# Altium footprint library chipfc_libs.PCBLIB: 315 footprints (part 7 of 20)
Each footprint in its own frame and in the unit in brackets; x right, y up, seen from the top. Pads: shape width x height; smd on the part's side, far side on the other; paste and mask are expansions set on the pad; w line width, h text height; cw(c..) or ccw(c..) is an arc to the next point about the centre after c.
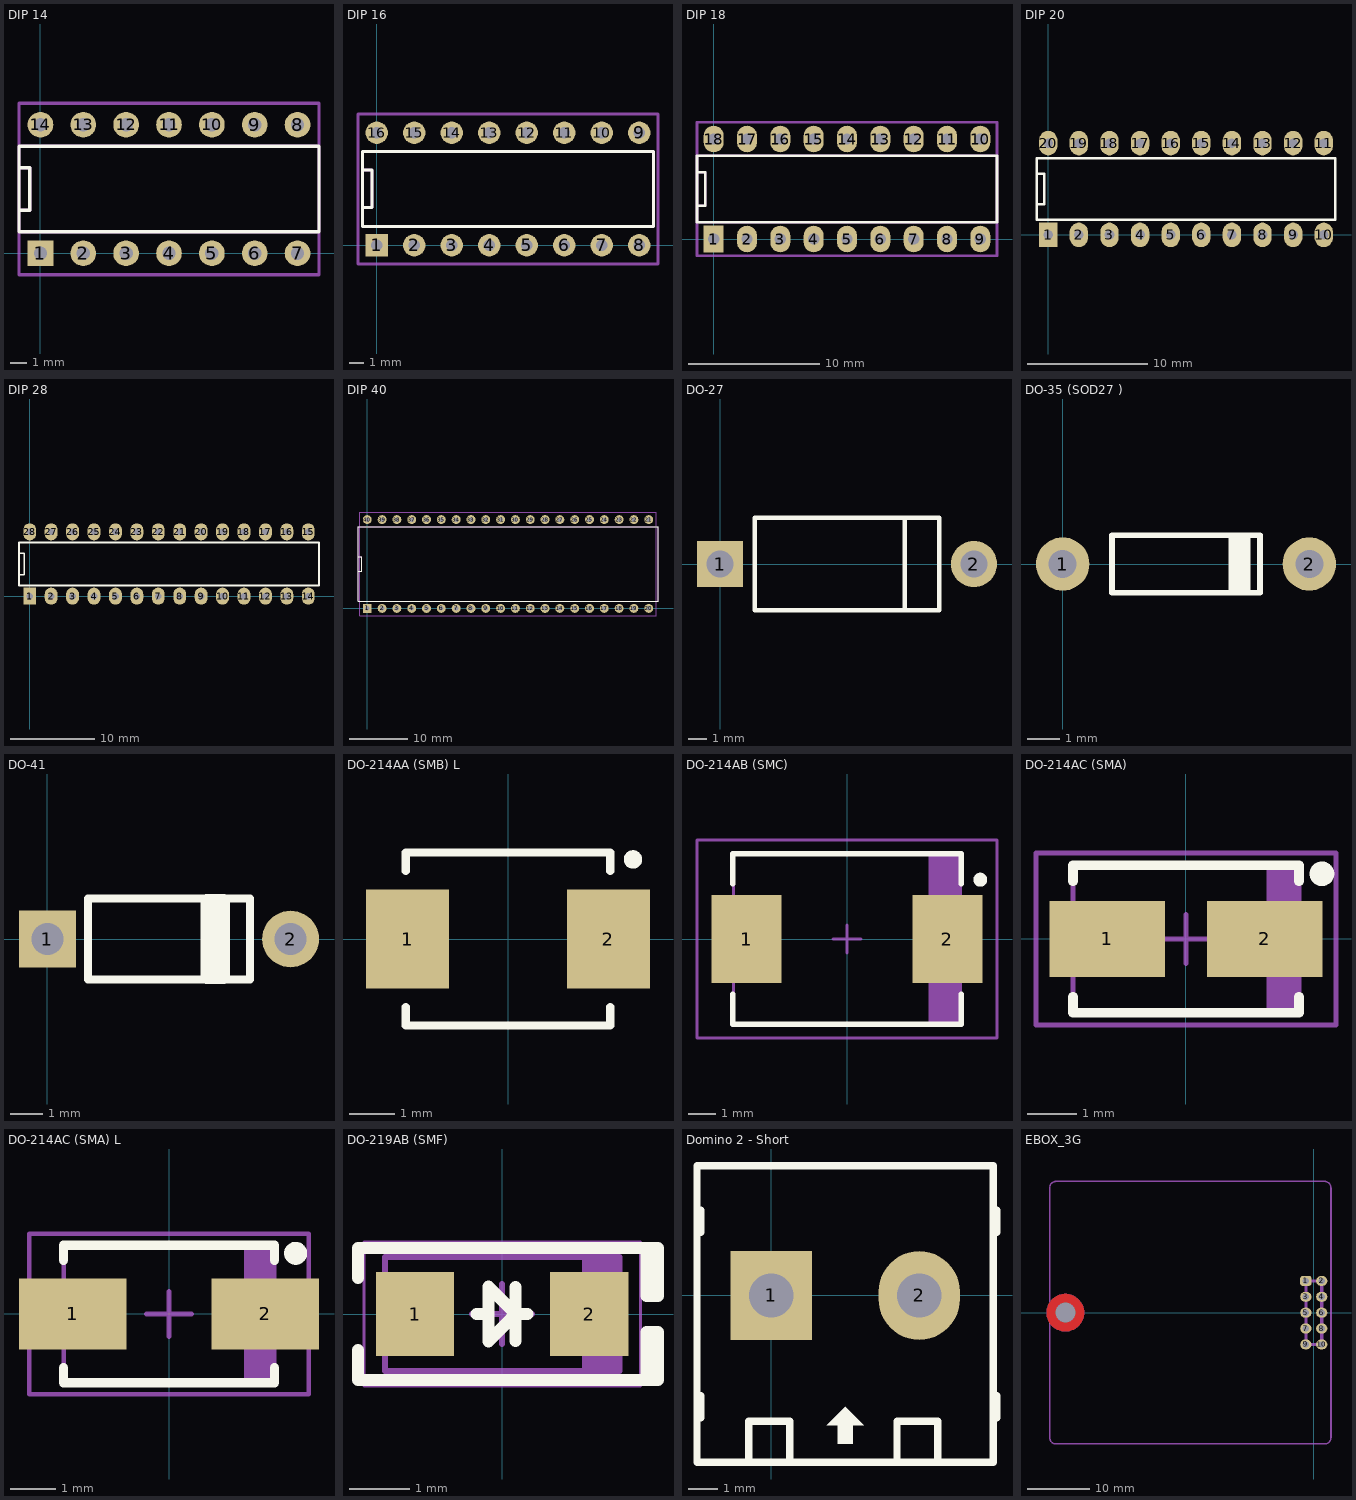
[diagram p6: the footprints below, top view; thin cyan lines are the x and y axes]

## DIP 14 [mil]
pads (14):
  rect 60x60 / inner round 60 / far side rect 60x80 hole 31: 1(0,0)
  round 60 / inner round 60 / far side oval 60x80 hole 31: 2(100,0) 3(200,0) 4(300,0) 5(400,0) 6(500,0) 7(600,0) 8(600,300) 9(500,300) 10(400,300) 11(300,300) 12(200,300) 13(100,300) 14(0,300)
Top Overlay:
  lines w8: -50,100 -25,100 -25,200 -50,200 ; -50,200 -50,250 650,250 650,50 -50,50 -50,200
Mechanical 1:
  lines w8: -50,100 -25,100 -25,200 -50,200 ; -50,200 -50,250 650,250 650,50 -50,50 -50,200
Mechanical 3:
  lines w8: -50,-50 -50,50 -50,100 -50,350 -47.7,350 650,350 650,250 650,-50 -50,-50

## DIP 16 [mil]
pads (16):
  rect 60x60 / inner round 60 / far side rect 60x80 hole 31: 1(0,0)
  round 60 / inner round 60 / far side oval 60x80 hole 31: 2(100,0) 3(200,0) 4(300,0) 5(400,0) 6(500,0) 7(600,0) 8(700,0) 9(700,300) 10(600,300) 11(500,300) 12(400,300) 13(300,300) 14(200,300) 15(100,300) 16(0,300)
Top Overlay:
  lines w8: -37.5,100 -37.5,200 ; -37.5,100 -37.5,50 737.5,50 737.5,250 -37.5,250 -37.5,200 ; -37.5,100 -12.5,100 -12.5,200 -37.5,200
Mechanical 1:
  lines w8: -37.5,100 -37.5,200 ; -37.5,100 -37.5,50 737.5,50 737.5,250 -37.5,250 -37.5,200 ; -37.5,100 -12.5,100 -12.5,200 -37.5,200
Mechanical 3:
  lines w8: -50,-50 750,-50 750,250 750,350 -50,350 -50,200 -50,100 -50,50 -50,-50

## DIP 18 [mil]
pads (18):
  rect 60x80 hole 34: 1(0,0)
  oval 60x80 hole 34: 2(100,0) 3(200,0) 4(300,0) 5(400,0) 6(500,0) 7(600,0) 8(700,0) 9(800,0) 10(800,300) 11(700,300) 12(600,300) 13(500,300) 14(400,300) 15(300,300) 16(200,300) 17(100,300) 18(0,300)
Top Overlay:
  lines w8: -50,100 -25,100 -25,200 -50,200 ; -50,50 850,50 850,250 -50,250 -50,50
Mechanical 1:
  lines w8: -50,100 -25,100 -25,200 -50,200 ; -50,50 850,50 850,250 -50,250 -50,50
Mechanical 3:
  lines w8: -50,-50 -50,50 -50,100 -50,200 -50,350 850,350 850,246.8 850,49 850,-50 -50,-50

## DIP 20 [mil]
pads (20):
  rect 60x80 hole 31.5: 1(0,0)
  oval 60x80 hole 31.5: 2(100,0) 3(200,0) 4(300,0) 5(400,0) 6(500,0) 7(600,0) 8(700,0) 9(800,0) 10(900,0) 11(900,300) 12(800,300) 13(700,300) 14(600,300) 15(500,300) 16(400,300) 17(300,300) 18(200,300) 19(100,300) 20(0,300)
Top Overlay:
  lines w8: -37.5,100 -12.5,100 -12.5,200 -37.5,200 ; -37.5,100 -37.5,50 937.5,50 937.5,250 -37.5,250 -37.5,200 ; -37.5,100 -37.5,200

## DIP 28 [mil]
pads (28):
  rect 60x80 hole 31.5: 1(0,0)
  oval 60x80 hole 31.5: 2(100,0) 3(200,0) 4(300,0) 5(400,0) 6(500,0) 7(600,0) 8(700,0) 9(800,0) 10(900,0) 11(1000,0) 12(1100,0) 13(1200,0) 14(1300,0) 15(1300,300) 16(1200,300) 17(1100,300) 18(1000,300) 19(900,300) 20(800,300) 21(700,300) 22(600,300) 23(500,300) 24(400,300) 25(300,300) 26(200,300) 27(100,300) 28(0,300)
Top Overlay:
  lines w8: -50,100 -25,100 -25,200 -50,200 ; -50,100 -50,200 ; -50,100 -50,50 1350,50 1350,250 -50,250 -50,200

## DIP 40 [mil]
pads (40):
  rect 60x60 / inner round 60 / far side rect 60x80 hole 31: 1(0,0)
  round 60 / inner round 60 / far side oval 60x80 hole 31: 2(100,0) 3(200,0) 4(300,0) 5(400,0) 6(500,0) 7(600,0) 8(700,0) 9(800,0) 10(900,0) 11(1000,0) 12(1100,0) 13(1200,0) 14(1300,0) 15(1400,0) 16(1500,0) 17(1600,0) 18(1700,0) 19(1800,0) 20(1900,0) 21(1900,600) 22(1800,600) 23(1700,600) 24(1600,600) 25(1500,600) 26(1400,600) 27(1300,600) 28(1200,600) 29(1100,600) 30(1000,600) 31(900,600) 32(800,600) 33(700,600) 34(600,600) 35(500,600) 36(400,600) 37(300,600) 38(200,600) 39(100,600) 40(0,600)
Top Overlay:
  lines w8: -62.5,250 -37.5,250 -37.5,350 -62.5,350 ; -62.5,250 -62.5,50 1962.5,50 1962.5,550 -62.5,550 -62.5,350 ; -62.5,250 -62.5,350
Mechanical 1:
  lines w8: -62.5,250 -37.5,250 -37.5,350 -62.5,350 ; -62.5,250 -62.5,50 1962.5,50 1962.5,550 -62.5,550 -62.5,350 ; -62.5,250 -62.5,350
Mechanical 3:
  lines w8: -50,-50 -50,350 -50,650 1950,650 1950,-50 -50,-50

## DO-27 [mm]
height 2.54
pads (2):
  rect 2.54x2.54 hole 1.5: 1(0,0)
  round 2.54 hole 1.5: 2(13.97,0)
Top Overlay:
  lines w0.254: 10.16,-2.54 10.16,2.54 ; 1.905,-2.54 1.905,2.54 12.065,2.54 12.065,-2.54 1.905,-2.54

## DO-35 (SOD27 ) [mil]
pads (2):
  round 65 hole 34: 1(0,0) 2(300,0)
Top Overlay:
  lines w7: 205,-35 205,35 ; 210,-35 210,35 ; 215,-35 215,35 ; 220,-35 220,35 ; 225,-35 225,35 ; 60,-35 240,-35 240,35 60,35 60,-35
3D body "User Library-DO-35.step": height 77.8, standoff -95.83, extent -11.02,-37.79 311.02,37.8

## DO-41 [mil]
height 100
pads (2):
  rect 70x70 hole 39.37: 1(0,0)
  round 70 hole 39.37: 2(300,0)
Top Overlay:
  region: 223.41,53.83 225,50 225,-50 223.41,-53.83 219.59,-55.41 194.59,-55.41 190.76,-53.83 189.18,-50 189.18,50 190.76,53.83 194.59,55.41 219.59,55.41
  lines w10: 50,-50 250,-50 250,50 50,50 50,-50
3D body "User Library-DO-41G-30.step": height 99.25, standoff -78.74, extent -15.36,-47.28 315.35,47.28

## DO-214AA (SMB) L [mm]
pads (2):
  rect 1.82x2.18 smd: 1(-2.21,0) 2(2.21,0)
Top Overlay:
  circle w0.203: c2.75,1.75 r0.102
  lines w0.178: -2.25,-1.5 -2.25,-1.9 2.25,-1.9 2.25,-1.5 ; -2.25,1.5 -2.25,1.9 2.25,1.9 2.25,1.5
3D body "User Library-DIOM5539X24.step": height 2.45, standoff 0.03, extent -2.75,-1.95 2.75,1.95

## DO-214AB (SMC) [mm] "Molded Diode, 2-Leads, Body 7.9x5.8mm, IPC Low Density"
height 2.41
pads (2):
  rect 2.5x3.15 smd: 1(-3.6,0) 2(3.6,0)
Top Overlay:
  circle w0.25: c4.775,2.125 r0.125
  lines w0.2: -4.1,-1.975 -4.1,-3.05 4.1,-3.05 4.1,-1.975 ; -4.1,1.975 -4.1,3.05 4.1,3.05 4.1,1.975
Mechanical 13:
  rectangle: 2.92,-3.05 4.013,3.05
  lines w0.1: -4.065,-3.05 4.065,-3.05 4.065,3.05 -4.065,3.05 -4.065,-3.05
Mechanical 15:
  lines w0.1: -0.5,0 0.5,0 ; 0,-0.5 0,0.5 ; -5.375,-3.55 5.375,-3.55 5.375,3.55 -5.375,3.55 -5.375,-3.55
3D body "User Library-DO-214AB SMC.step": height 2.27, standoff -0.03, extent -3.975,-2.979 3.975,2.921

## DO-214AC (SMA) [mm] "Molded Diode, 2-Leads, Body 4.3x2.7mm, IPC Medium Density"
height 2.5
pads (2):
  rect 2.35x1.55 smd: 1(-1.6,0) 2(1.6,0)
Top Overlay:
  circle w0.25: c2.765,1.325 r0.125
  lines w0.2: -2.3,-1.175 -2.3,-1.5 2.3,-1.5 2.3,-1.175 ; -2.3,1.175 -2.3,1.5 2.3,1.5 2.3,1.175
Mechanical 13:
  rectangle: 1.637,-1.45 2.256,1.45
  lines w0.1: -2.3,-1.45 2.3,-1.45 2.3,1.45 -2.3,1.45 -2.3,-1.45
Mechanical 15:
  lines w0.1: -0.5,0 0.5,0 ; 0,-0.5 0,0.5 ; -3.05,-1.75 3.05,-1.75 3.05,1.75 -3.05,1.75 -3.05,-1.75
3D body "User Library-DO-214AC SMA.step": height 2.4, standoff 0, extent -2.6,-1.295 2.6,1.305

## DO-214AC (SMA) L [mm] "Molded Diode, 2-Leads, Body 4.3x2.7mm, IPC Medium Density"
height 2.5
pads (2):
  rect 2.35x1.55 smd: 1(-2.1,0) 2(2.1,0)
Top Overlay:
  circle w0.25: c2.765,1.325 r0.125
  lines w0.2: -2.3,-1.175 -2.3,-1.5 2.3,-1.5 2.3,-1.175 ; -2.3,1.175 -2.3,1.5 2.3,1.5 2.3,1.175
Mechanical 13:
  rectangle: 1.637,-1.45 2.256,1.45
  lines w0.1: -2.3,-1.45 -2.3,1.45 2.3,1.45 2.3,-1.45 -2.3,-1.45
Mechanical 15:
  lines w0.1: -0.5,0 0.5,0 ; 0,-0.5 0,0.5 ; -3.05,-1.75 -3.05,1.75 3.05,1.75 3.05,-1.75 -3.05,-1.75
3D body "User Library-DO-214AC SMA.step": height 2.4, standoff 0, extent -2.6,-1.295 2.6,1.305

## DO-219AB (SMF) [mm] "Molded Diode, 2-Leads, Body 3.90x1.90mm, IPC Medium Density"
height 1.1
pads (2):
  rect 1.3x1.4 smd: 1(-1.45,0) 2(1.45,0)
Top Overlay:
  lines w0.2: -2.4,-0.6 -2.4,-1.1 2.594,-1.1 2.594,-0.3 2.4,-0.3 2.4,-1.1 ; -2.4,0.6 -2.4,1.1 2.594,1.1 2.594,0.3 2.4,0.3 2.4,1.1 ; -0.429,-0.004 -0.229,-0.004 ; 0.225,-0.45 0.225,0.45 ; 0.425,0 0.225,0 ; 0.225,0 -0.229,-0.454 -0.229,0.454 0.225,0
Mechanical 13:
  rectangle: 1.331,-0.95 1.95,0.95
  lines w0.1: -1.95,-0.95 -1.95,0.95 1.95,0.95 1.95,-0.95 -1.95,-0.95
Mechanical 15:
  lines w0.05: -2.3,-1.2 2.3,-1.2 2.3,1.2 -2.3,1.2 -2.3,-1.2
  lines w0.1: -0.5,0 0.5,0 ; 0,-0.5 0,0.5
3D body "Vishay - SMF.step": height 1.18, standoff 0, extent -1.5,-0.898 1.5,0.898

## Domino 2 - Short [mil] "Header 2, 2 pin, hight 400mil, Pin to Pin 200mil, Colour Green"
height 300
pads (2):
  rect 110x120 hole 60: 1(0,0)
  oval 110x120 hole 60: 2(200,0)
Top Overlay:
  region: 100,-150 75,-175 90,-175 90,-200 110,-200 110,-175 125,-175
  lines w10: -95,-165 -95,-135 ; -95,85 -95,115 ; -30,-225 -30,-170 25,-170 25,-225 ; 170,-225 170,-170 225,-170 225,-225 ; 305,-165 305,-135 ; 305,85 305,115 ; -100,-225 -100,175 300,175 300,-225 -100,-225
3D body "2 way std vertical terminal 5.08mm pitch.stp": height 559.05, standoff -137.8, extent -129.17,-217.91 300,167.91

## EBOX_3G [mm]
pads (11):
  rrect50% 1.8x1.6 hole 1: 1(-1.27,5.08)
  oval 1.8x1.6 hole 1: 2(1.27,5.08) 3(-1.27,2.54) 4(1.27,2.54) 5(-1.27,0) 6(1.27,0) 7(-1.27,-2.54) 8(1.27,-2.54) 9(-1.27,-5.08) 10(1.27,-5.08)
  round 0 hole 3.2 unplated: HOLE(-39.75,0)
Top Layer:
  pour cut-out: -42.75,0 -42.75,-0.197 -42.699,-0.586 -42.597,-0.966 -42.446,-1.33 -42.25,-1.67 -42.01,-1.982 -41.732,-2.26 -41.42,-2.5 -41.08,-2.696 -40.716,-2.847 -40.337,-2.949 -39.947,-3 -39.75,-3 -39.553,-3 -39.164,-2.949 -38.784,-2.847 -38.42,-2.696 -38.08,-2.5 -37.768,-2.26 -37.49,-1.982 -37.25,-1.67 -37.054,-1.33 -36.903,-0.966 -36.801,-0.586 -36.75,-0.197 -36.75,0 -36.75,0.197 -36.801,0.587 -36.903,0.967 -37.054,1.33 -37.25,1.67 -37.49,1.982 -37.768,2.26 -38.08,2.5 -38.42,2.696 -38.784,2.847 -39.164,2.949 -39.553,3 -39.75,3 -39.947,3 -40.337,2.949 -40.716,2.847 -41.08,2.696 -41.42,2.5 -41.732,2.26 -42.01,1.982 -42.25,1.67 -42.446,1.33 -42.597,0.966 -42.699,0.587 -42.75,0.197
Bottom Layer:
  pour cut-out: -42.75,0 -42.75,-0.197 -42.699,-0.586 -42.597,-0.966 -42.446,-1.33 -42.25,-1.67 -42.01,-1.982 -41.732,-2.26 -41.42,-2.5 -41.08,-2.696 -40.716,-2.847 -40.337,-2.949 -39.947,-3 -39.75,-3 -39.553,-3 -39.164,-2.949 -38.784,-2.847 -38.42,-2.696 -38.08,-2.5 -37.768,-2.26 -37.49,-1.982 -37.25,-1.67 -37.054,-1.33 -36.903,-0.966 -36.801,-0.586 -36.75,-0.197 -36.75,0 -36.75,0.197 -36.801,0.587 -36.903,0.967 -37.054,1.33 -37.25,1.67 -37.49,1.982 -37.768,2.26 -38.08,2.5 -38.42,2.696 -38.784,2.847 -39.164,2.949 -39.553,3 -39.75,3 -39.947,3 -40.337,2.949 -40.716,2.847 -41.08,2.696 -41.42,2.5 -41.732,2.26 -42.01,1.982 -42.25,1.67 -42.446,1.33 -42.597,0.966 -42.699,0.587 -42.75,0.197
Bottom Overlay:
  circle w0.203: c-39.75,0 r2.5
  region: -39.75,-2.5 -39.725,-2.5 -39.482,-2.5 -39.003,-2.405 -38.553,-2.218 -38.147,-1.947 -37.975,-1.775 -38.625,-1.125 -38.737,-1.226 -38.987,-1.394 -39.265,-1.509 -39.561,-1.568 -39.711,-1.575 -39.75,-1.575
  region: -42.25,0 -42.25,-0.025 -42.25,-0.268 -42.155,-0.747 -41.968,-1.197 -41.697,-1.603 -41.525,-1.775 -40.875,-1.125 -40.976,-1.013 -41.144,-0.763 -41.259,-0.485 -41.318,-0.189 -41.325,-0.039 -41.325,0
  region: -39.75,2.5 -39.775,2.5 -40.019,2.5 -40.497,2.405 -40.947,2.218 -41.353,1.947 -41.525,1.775 -40.875,1.125 -40.763,1.226 -40.513,1.394 -40.235,1.509 -39.939,1.568 -39.789,1.575 -39.75,1.575
  region: -37.25,0 -37.25,0.025 -37.25,0.269 -37.345,0.747 -37.532,1.197 -37.803,1.603 -37.975,1.775 -38.625,1.125 -38.524,1.013 -38.356,0.763 -38.241,0.485 -38.182,0.189 -38.175,0.039 -38.175,0
  lines w0.203: -2.667,6.604 -2.54,6.477 ; -2.54,6.477 2.54,6.477 2.54,-6.35 -2.54,-6.35 -2.54,6.477
  lines w0.254: -44.446,-21.431 -44.445,-21.43 3.555,-21.43 3.554,-21.429 3.554,20.571 -44.446,20.571 -44.446,-21.431
Mechanical 1:
  circle w0.254: c-1.27,5.08 r0.5
  circle w0.254: c1.27,-5.08 r0.5
  circle w0.254: c-39.75,0 r1.06
  lines w0.254: -41.25,21 ccw(c-41.25,20) -42.25,20 -42.25,-20 ccw(c-41.25,-20) -41.25,-21 1.75,-21 ccw(c1.75,-20) 2.75,-20 2.75,20 ccw(c1.75,20) 1.75,21 ; -41.25,21 1.75,21
  lines w0.5: -1.27,-5.08 -1.27,5.08 1.27,5.08 1.27,-5.08 -1.27,-5.08
  text "GND" at 3.5,-4.5 h1.6
  text "USB_DP" at -9,-2 h1.6
  text "USB_DM" at -9.25,0.5 h1.6
  text "UART_RX" at 3.5,-2 h1.6
  text "UART_TX" at 3.5,0.5 h1.6
  text "PWRKEY" at -9.5,3 h1.6
  text "PRESET" at 3.5,3 h1.6
  text "VIN" at -5.75,5.75 h1.6
  text "VIN" at 3.5,5.75 h1.6
  text "GND" at -6.52,-4.42 h1.6
3D body "eBox_4G_SIM7600_V2.1.step": height 20.3, standoff 2.11, extent -46.696,-23.679 3.555,20.572
3D body "User Library-zl262-10d_p2-54_l13-2_w5_h8-5.step": height 8.5, standoff -3, extent -2.5,-6.6 2.5,6.6
3D body "User Library-zl262-10d_p2-54_l13-2_w5_h8-5.step": height 2.5, standoff -2.5, extent -19.35,0.25 -6.15,11.75